# Altium schematic symbol library SYN480R.SchLib: 1 symbol
Pins are listed as number, name and electrical type; pins without a type are passive.

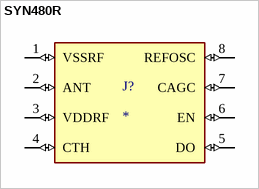
[diagram p0: symbol SYN480R]

## SYN480R
designator J?
RF Transceiver ICs Rx Only 300MHz~450MHz 3V~5.5V SOIC-8_150mil RoHS; MF: Synoxo; MP: SYN480R; SnapEDA_Link: https://www.snapeda.com/parts/SYN480R/Synoxo/view-part/?ref=snap; Package: Package; Value: *; Check_prices: https://www.snapeda.com/parts/SYN480R/Synoxo/view-part/?ref=eda
footprint SOIC-8
pins: 1 VSSRF (io), 2 ANT (io), 3 VDDRF (io), 4 CTH (io), 5 DO (io), 6 EN (io), 7 CAGC (io), 8 REFOSC (io)